# Altium schematic symbol library CONN,Mini-Fit-Jr,Hdr,2x2,Pos,Vert,Thru.SchLib: 1 symbol
Pins are listed as number, name and electrical type; pins without a type are passive.

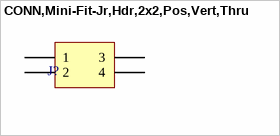
[diagram p0: symbol CONN,Mini-Fit-Jr,Hdr,2x2,Pos,Vert,Thru]

## CONN,Mini-Fit-Jr,Hdr,2x2,Pos,Vert,Thru
designator J?
pins: 1 (power), 2 (power), 3 (power), 4 (power)